# Altium footprint library Master.PcbLib: 178 footprints (part 3 of 12)
Each footprint in its own frame and in the unit in brackets; x right, y up, seen from the top. Pads: shape width x height; smd on the part's side, far side on the other; paste and mask are expansions set on the pad; w line width, h text height; cw(c..) or ccw(c..) is an arc to the next point about the centre after c.
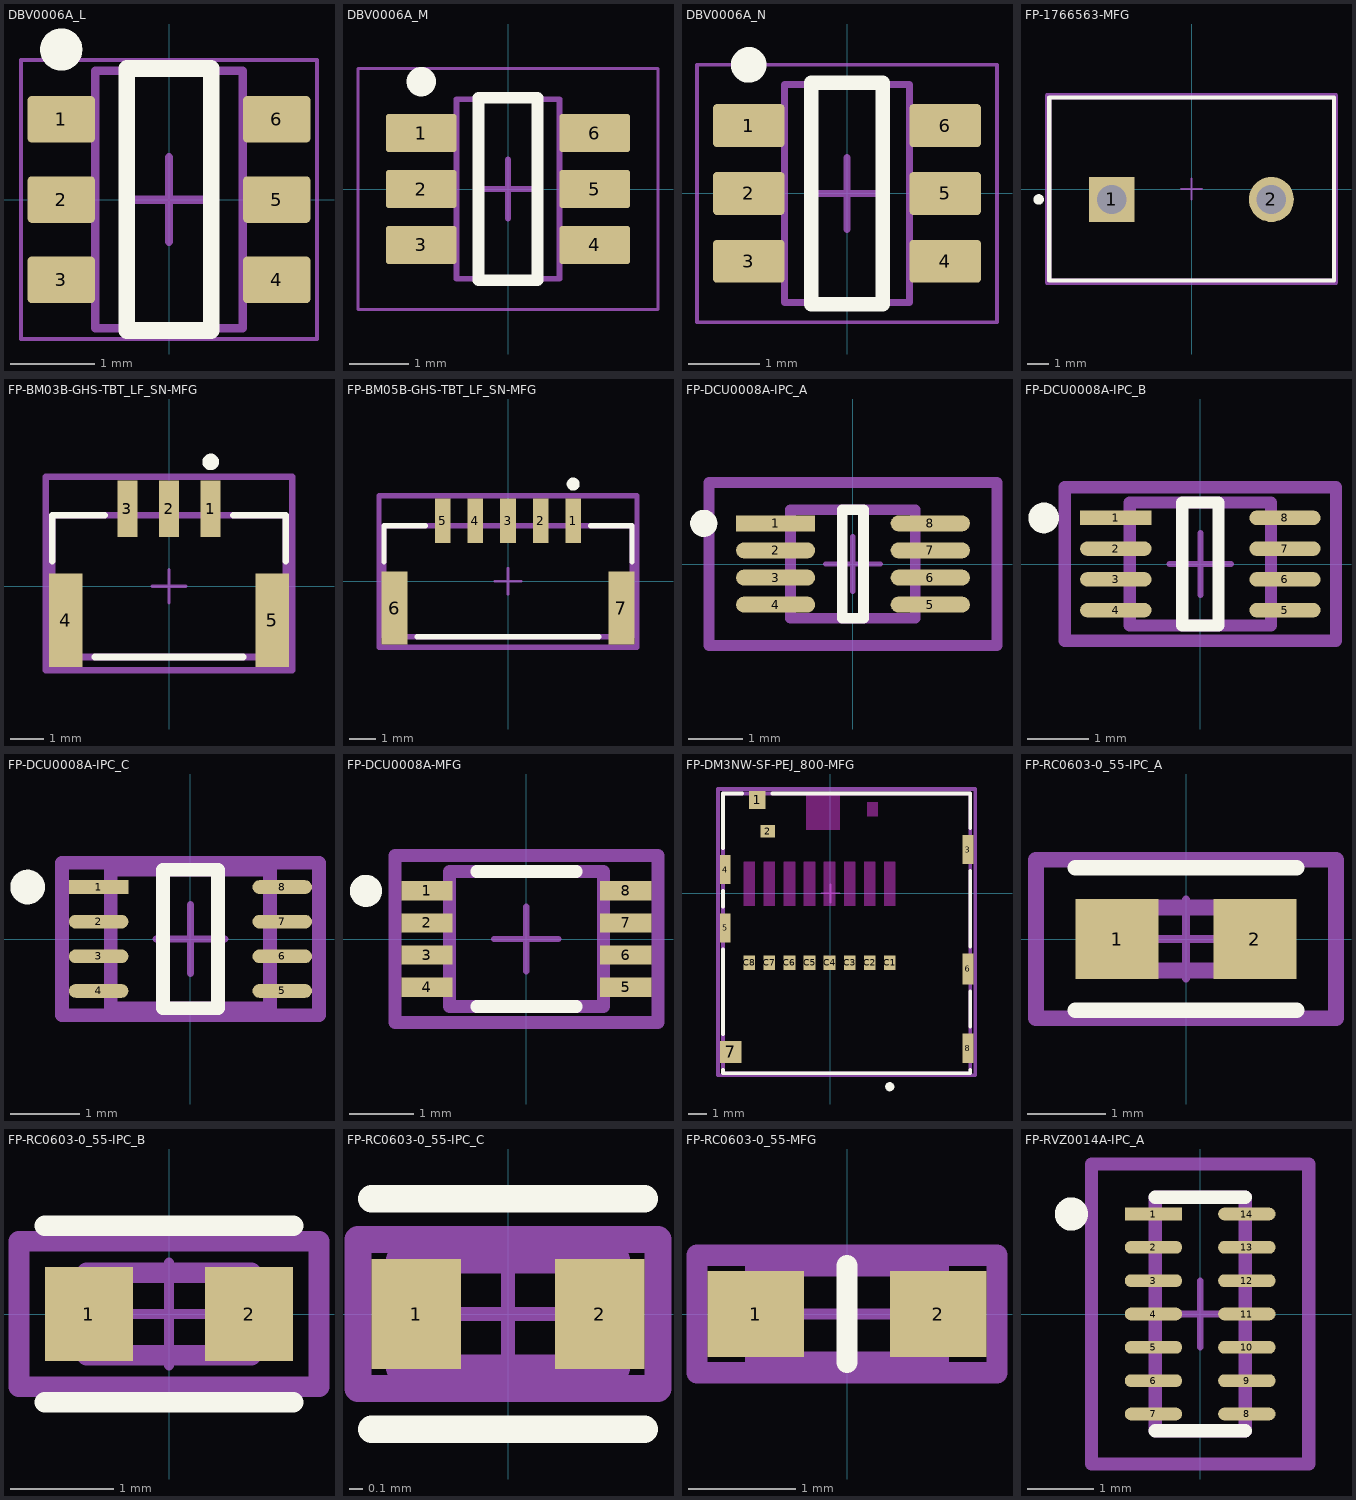
[diagram p2: the footprints below, top view; thin cyan lines are the x and y axes]

## DBV0006A_L [mm] "SOT23, 6-Leads, Body 3.05x1.75mm, Pitch 0.95mm, IPC High Density"
height 1.45
pads (6):
  rrect18% 0.8x0.55 smd: 1(-1.275,0.95) 2(-1.275,0) 3(-1.275,-0.95) 4(1.275,-0.95) 5(1.275,0) 6(1.275,0.95)
Top Overlay:
  circle w0.25: c-1.275,1.775 r0.125
  lines w0.2: -0.5,-1.55 0.5,-1.55 0.5,1.55 -0.5,1.55 -0.5,-1.55
Mechanical 1:
  text ".Designator" at -0.635,-0.127 h0.4
Mechanical 13:
  lines w0.1: -0.875,-1.525 -0.875,1.525 0.875,1.525 0.875,-1.525 -0.875,-1.525
Top Courtyard:
  lines w0.05: -1.75,-1.65 -1.75,1.65 1.75,1.65 1.75,-1.65 -1.75,-1.65
  lines w0.1: -0.5,0 0.5,0 ; 0,-0.5 0,0.5
3D body "DBV0006AakaMF06A.stp": height 1.11, standoff -0.01, extent -1.422,-1.461 1.422,1.46

## DBV0006A_M [mm] "SOT23, 6-Leads, Body 3.05x1.75mm, Pitch 0.95mm, IPC Low Density"
height 1.45
pads (6):
  rrect15% 1.2x0.65 smd: 1(-1.475,0.95) 2(-1.475,0) 3(-1.475,-0.95) 4(1.475,-0.95) 5(1.475,0) 6(1.475,0.95)
Top Overlay:
  circle w0.25: c-1.475,1.825 r0.125
  lines w0.2: -0.5,-1.55 -0.5,1.55 0.5,1.55 0.5,-1.55 -0.5,-1.55
Mechanical 1:
  text ".Designator" at -0.635,-0.127 h0.4
Mechanical 13:
  lines w0.1: -0.875,-1.525 0.875,-1.525 0.875,1.525 -0.875,1.525 -0.875,-1.525
Top Courtyard:
  lines w0.05: -2.55,-2.05 2.55,-2.05 2.55,2.05 -2.55,2.05 -2.55,-2.05
  lines w0.1: -0.5,0 0.5,0 ; 0,-0.5 0,0.5
3D body "DBV0006AakaMF06A.stp": height 1.11, standoff -0.01, extent -1.422,-1.461 1.422,1.46

## DBV0006A_N [mm] "SOT23, 6-Leads, Body 3.05x1.75mm, Pitch 0.95mm, IPC Medium Density"
height 1.45
pads (6):
  rrect17% 1x0.6 smd: 1(-1.375,0.95) 2(-1.375,0) 3(-1.375,-0.95) 4(1.375,-0.95) 5(1.375,0) 6(1.375,0.95)
Top Overlay:
  circle w0.25: c-1.375,1.8 r0.125
  lines w0.2: -0.5,-1.55 0.5,-1.55 0.5,1.55 -0.5,1.55 -0.5,-1.55
Mechanical 1:
  text ".Designator" at -0.635,-0.127 h0.4
Mechanical 13:
  lines w0.1: -0.875,-1.525 -0.875,1.525 0.875,1.525 0.875,-1.525 -0.875,-1.525
Top Courtyard:
  lines w0.05: -2.1,-1.8 -2.1,1.8 2.1,1.8 2.1,-1.8 -2.1,-1.8
  lines w0.1: -0.5,0 0.5,0 ; 0,-0.5 0,0.5
3D body "DBV0006AakaMF06A.stp": height 1.11, standoff -0.01, extent -1.422,-1.461 1.422,1.46

## FP-1766563-MFG [mm]
pads (2):
  rect 2.15x2.15 hole 1.4 paste-2539.97 mask+0: 1(-3.81,-0.5)
  round 2.15 hole 1.4 paste-2539.97 mask+0: 2(3.81,-0.5)
Top Overlay:
  circle w0.25: c-7.3,-0.5 r0.125
  lines w0.2: -6.795,-4.375 -6.795,4.375 6.795,4.375 6.795,-4.375 -6.795,-4.375
Top 3D Body:
  lines w0.2: -6.795,-4.375 -6.795,4.375 6.795,4.375 6.795,-4.375 -6.795,-4.375
Top Component Center:
  lines w0.1: -0.5,0 0.5,0 ; 0,-0.5 0,0.5
Top Assembly:
  lines w0.2: -6.895,-4.475 -6.895,4.475 6.895,4.475 6.895,-4.475 -6.895,-4.475
  text ".Designator" at 0,0.188 h1
Top Courtyard:
  lines w0.2: -6.895,-4.475 -6.895,4.475 6.895,4.475 6.895,-4.475 -6.895,-4.475
3D body "Conn_Phoenix_Contact_1766563_eec.STEP": height 0.25, standoff 0, extent -6.895,-4.475 6.895,4.475

## FP-BM03B-GHS-TBT_LF_SN-MFG [mm]
pads (5):
  rect 0.6x1.7 smd paste+0 mask+0: 1(1.25,2.325) 2(0,2.325) 3(-1.25,2.325)
  rect 1x2.8 smd paste+0 mask+0: 4(-3.1,-1.025) 5(3.1,-1.025)
Top Overlay:
  circle w0.25: c1.25,3.725 r0.125
  lines w0.2: -3.5,0.75 -3.5,2.125 -1.925,2.125 ; -2.225,-2.125 2.225,-2.125 ; 1.925,2.125 3.5,2.125 3.5,0.75
Top 3D Body:
  lines w0.2: -3.5,-2.125 -3.5,2.125 3.5,2.125 3.5,-2.125 -3.5,-2.125
Top Component Center:
  lines w0.1: -0.5,0 0.5,0 ; 0,-0.5 0,0.5
Top Assembly:
  lines w0.2: -3.7,-2.525 -3.7,3.275 3.7,3.275 3.7,-2.525 -3.7,-2.525
  text ".Designator" at 0,0.563 h1
Top Courtyard:
  lines w0.2: -3.7,-2.525 -3.7,3.275 3.7,3.275 3.7,-2.525 -3.7,-2.525
3D body "Conn_JST_BM03B-GHS-TBT_LF_SN_N_eec.STEP": height 0.25, standoff 0, extent -3.7,-2.525 3.7,3.275

## FP-BM05B-GHS-TBT_LF_SN-MFG [mm]
pads (7):
  rect 0.6x1.7 smd paste+0 mask+0: 1(2.5,2.325) 2(1.25,2.325) 3(0,2.325) 4(-1.25,2.325) 5(-2.5,2.325)
  rect 1x2.8 smd paste+0 mask+0: 6(-4.35,-1.025) 7(4.35,-1.025)
Top Overlay:
  circle w0.25: c2.5,3.725 r0.125
  lines w0.2: -4.75,0.75 -4.75,2.125 -3.175,2.125 ; -3.475,-2.125 3.475,-2.125 ; 3.175,2.125 4.75,2.125 4.75,0.75
Top 3D Body:
  lines w0.2: -4.75,-2.125 -4.75,2.125 4.75,2.125 4.75,-2.125 -4.75,-2.125
Top Component Center:
  lines w0.1: -0.5,0 0.5,0 ; 0,-0.5 0,0.5
Top Assembly:
  lines w0.2: -4.95,-2.525 -4.95,3.275 4.95,3.275 4.95,-2.525 -4.95,-2.525
  text ".Designator" at 0,0.563 h1
Top Courtyard:
  lines w0.2: -4.95,-2.525 -4.95,3.275 4.95,3.275 4.95,-2.525 -4.95,-2.525
3D body "Conn_JST_BM05B-GHS-TBT_LF_SN_N_eec.STEP": height 0.25, standoff 0, extent -4.95,-2.525 4.95,3.275

## FP-DCU0008A-IPC_A [mm]
pads (8):
  rect 1.46x0.297 smd paste+0 mask+0: 1(-1.426,0.75)
  rrect100% 1.46x0.297 smd paste+0 mask+0: 2(-1.426,0.25) 3(-1.426,-0.25) 4(-1.426,-0.75) 5(1.426,-0.75) 6(1.426,-0.25) 7(1.426,0.25) 8(1.426,0.75)
Top Overlay:
  circle w0.25: c-2.75,0.75 r0.125
  lines w0.2: -0.196,-1 -0.196,1 0.196,1 0.196,-1 -0.196,-1
Top 3D Body:
  lines w0.2: -1.15,-1 -1.15,1 1.15,1 1.15,-1 -1.15,-1
Top Component Center:
  lines w0.1: -0.5,0 0.5,0 ; 0,-0.5 0,0.5
Top Assembly:
  lines w0.2: -2.656,-1.5 -2.656,1.5 2.656,1.5 2.656,-1.5 -2.656,-1.5
  text ".Designator" at 0,0.188 h1
Top Courtyard:
  lines w0.2: -2.656,-1.5 -2.656,1.5 2.656,1.5 2.656,-1.5 -2.656,-1.5
3D body "IC_Texas_Instruments_SN74LVC3G34DCUR_eec.STEP": height 0.25, standoff 0, extent -2.656,-1.5 2.656,1.5

## FP-DCU0008A-IPC_B [mm]
pads (8):
  rect 1.16x0.237 smd paste+0 mask+0: 1(-1.376,0.75)
  rrect100% 1.16x0.237 smd paste+0 mask+0: 2(-1.376,0.25) 3(-1.376,-0.25) 4(-1.376,-0.75) 5(1.376,-0.75) 6(1.376,-0.25) 7(1.376,0.25) 8(1.376,0.75)
Top Overlay:
  circle w0.25: c-2.55,0.75 r0.125
  lines w0.2: -0.296,-1 0.296,-1 0.296,1 -0.296,1 -0.296,-1
Top 3D Body:
  lines w0.2: -1.15,-1 1.15,-1 1.15,1 -1.15,1 -1.15,-1
Top Component Center:
  lines w0.1: -0.5,0 0.5,0 ; 0,-0.5 0,0.5
Top Assembly:
  lines w0.2: -2.206,-1.25 2.206,-1.25 2.206,1.25 -2.206,1.25 -2.206,-1.25
  text ".Designator" at 0,0.188 h1
Top Courtyard:
  lines w0.2: -2.206,-1.25 2.206,-1.25 2.206,1.25 -2.206,1.25 -2.206,-1.25
3D body "IC_Texas_Instruments_SN74LVC3G34DCUR_eec.STEP": height 0.25, standoff 0, extent -2.206,-1.25 2.206,1.25

## FP-DCU0008A-IPC_C [mm]
pads (8):
  rect 0.86x0.197 smd paste+0 mask+0: 1(-1.326,0.75)
  rrect100% 0.86x0.197 smd paste+0 mask+0: 2(-1.326,0.25) 3(-1.326,-0.25) 4(-1.326,-0.75) 5(1.326,-0.75) 6(1.326,-0.25) 7(1.326,0.25) 8(1.326,0.75)
Top Overlay:
  circle w0.25: c-2.35,0.75 r0.125
  lines w0.2: -0.396,-1 -0.396,1 0.396,1 0.396,-1 -0.396,-1
Top 3D Body:
  lines w0.2: -1.15,-1 -1.15,1 1.15,1 1.15,-1 -1.15,-1
Top Component Center:
  lines w0.1: -0.5,0 0.5,0 ; 0,-0.5 0,0.5
Top Assembly:
  lines w0.2: -1.856,-1.1 -1.856,1.1 1.856,1.1 1.856,-1.1 -1.856,-1.1
  text ".Designator" at 0,0.188 h1
Top Courtyard:
  lines w0.2: -1.856,-1.1 -1.856,1.1 1.856,1.1 1.856,-1.1 -1.856,-1.1
3D body "IC_Texas_Instruments_SN74LVC3G34DCUR_eec.STEP": height 0.25, standoff 0, extent -1.856,-1.1 1.856,1.1

## FP-DCU0008A-MFG [mm]
pads (8):
  rect 0.8x0.3 smd paste-1000 mask+0: 1(-1.55,0.75) 2(-1.55,0.25) 3(-1.55,-0.25) 4(-1.55,-0.75) 5(1.55,-0.75) 6(1.55,-0.25) 7(1.55,0.25) 8(1.55,0.75)
Top Overlay:
  circle w0.25: c-2.5,0.75 r0.125
  lines w0.2: -0.775,-1.05 0.775,-1.05 ; -0.775,1.05 0.775,1.05
Top Paste:
  rectangle: 1.175,-0.875 1.925,-0.625
  rectangle: 1.175,-0.375 1.925,-0.125
  rectangle: 1.175,0.125 1.925,0.375
  rectangle: 1.175,0.625 1.925,0.875
  rectangle: -1.925,-0.875 -1.175,-0.625
  rectangle: -1.925,-0.375 -1.175,-0.125
  rectangle: -1.925,0.125 -1.175,0.375
  rectangle: -1.925,0.625 -1.175,0.875
Top 3D Body:
  lines w0.2: -1.2,-1.05 -1.2,1.05 1.2,1.05 1.2,-1.05 -1.2,-1.05
Top Component Center:
  lines w0.1: -0.5,0 0.5,0 ; 0,-0.5 0,0.5
Top Assembly:
  lines w0.2: -2.05,-1.3 -2.05,1.3 2.05,1.3 2.05,-1.3 -2.05,-1.3
  text ".Designator" at 0,0.188 h1
Top Courtyard:
  lines w0.2: -2.05,-1.3 -2.05,1.3 2.05,1.3 2.05,-1.3 -2.05,-1.3
3D body "IC_Texas_Instruments_SN74LVC3G34DCUR_eec.STEP": height 0.25, standoff 0, extent -2.05,-1.3 2.05,1.3

## FP-DM3NW-SF-PEJ_800-MFG [mm]
pads (16):
  rect 0.9x1 smd paste+0 mask+0: 1(-4.02,5.12)
  rect 0.8x0.7 smd paste+0 mask+0: 2(-3.44,3.4)
  rect 0.6x1.6 smd paste+0 mask+0: 3(7.53,2.4) 4(-5.77,1.3) 5(-5.77,-1.9) 8(7.53,-8.5)
  rect 0.6x1.7 smd paste+0 mask+0: 6(7.53,-4.15)
  rect 1.2x1.2 smd paste+0 mask+0: 7(-5.47,-8.7)
  rect 0.64x0.8 smd paste+0 mask+0: C1(3.25,-3.8) C2(2.15,-3.8) C3(1.05,-3.8) C4(-0.05,-3.8) C5(-1.15,-3.8) C6(-2.25,-3.8) C7(-3.35,-3.8) C8(-4.45,-3.8)
Top Overlay:
  circle w0.25: c3.25,-10.605 r0.125
  lines w0.2: -5.895,-9.675 -5.895,-9.875 7.655,-9.875 7.655,-9.675 ; -5.895,-7.725 -5.895,-3.075 ; -5.895,-0.725 -5.895,0.125 ; -5.895,2.475 -5.895,5.475 -4.845,5.475 ; -3.195,5.475 7.655,5.475 7.655,3.575 ; 7.655,-7.325 7.655,-5.375 ; 7.655,-2.925 7.655,1.225
Keep-Out Layer:
  rectangle: 2.01,4.2 2.61,5
  rectangle: -1.35,3.48 0.51,5.48
  rectangle: 2.93,-0.705 3.57,1.745
  rectangle: 1.83,-0.705 2.47,1.745
  rectangle: 0.73,-0.705 1.37,1.745
  rectangle: -0.37,-0.705 0.27,1.745
  rectangle: -1.47,-0.705 -0.83,1.745
  rectangle: -2.57,-0.705 -1.93,1.745
  rectangle: -3.67,-0.705 -3.03,1.745
  rectangle: -4.77,-0.705 -4.13,1.745
Top 3D Body:
  lines w0.2: -5.895,-9.875 -5.895,5.475 7.655,5.475 7.655,-9.875 -5.895,-9.875
Top Component Center:
  lines w0.1: -0.5,0 0.5,0 ; 0,-0.5 0,0.5
Top Assembly:
  lines w0.2: -6.17,-9.975 -6.17,5.72 7.93,5.72 7.93,-9.975 -6.17,-9.975
  text ".Designator" at 0.88,-1.94 h1
Top Courtyard:
  lines w0.2: -6.17,-9.975 -6.17,5.72 7.93,5.72 7.93,-9.975 -6.17,-9.975
3D body "Conn_Hirose_Electric_Co_Ltd_DM3NW-SF-PEJ_800_eec.STEP": height 0.25, standoff 0, extent -6.17,-9.975 7.93,5.72

## FP-RC0603-0_55-IPC_A [mm]
pads (2):
  rect 1.059x1.012 smd paste+0 mask+0: 1(-0.877,0) 2(0.877,0)
Top Overlay:
  lines w0.2: -1.406,-0.906 1.406,-0.906 ; -1.406,0.906 1.406,0.906
Top 3D Body:
  lines w0.2: -0.8,-0.4 -0.8,0.4 0.8,0.4 0.8,-0.4 -0.8,-0.4
Top Component Center:
  lines w0.1: -0.5,0 0.5,0 ; 0,-0.5 0,0.5
Top Assembly:
  lines w0.2: -1.906,-1.006 -1.906,1.006 1.906,1.006 1.906,-1.006 -1.906,-1.006
  text ".Designator" at 0,0.188 h1
Top Courtyard:
  lines w0.2: -1.906,-1.006 -1.906,1.006 1.906,1.006 1.906,-1.006 -1.906,-1.006
3D body "Res_Yageo_RC0603FR-07100KL_eec.STEP": height 0.25, standoff 0, extent -1.906,-1.006 1.906,1.006

## FP-RC0603-0_55-IPC_B [mm]
pads (2):
  rect 0.859x0.912 smd paste+0 mask+0: 1(-0.777,0) 2(0.777,0)
Top Overlay:
  lines w0.2: -1.206,-0.856 1.206,-0.856 ; -1.206,0.856 1.206,0.856
Top 3D Body:
  lines w0.2: -0.8,-0.4 0.8,-0.4 0.8,0.4 -0.8,0.4 -0.8,-0.4
Top Component Center:
  lines w0.1: -0.5,0 0.5,0 ; 0,-0.5 0,0.5
Top Assembly:
  lines w0.2: -1.456,-0.706 1.456,-0.706 1.456,0.706 -1.456,0.706 -1.456,-0.706
  text ".Designator" at 0,0.188 h1
Top Courtyard:
  lines w0.2: -1.456,-0.706 1.456,-0.706 1.456,0.706 -1.456,0.706 -1.456,-0.706
3D body "Res_Yageo_RC0603FR-07100KL_eec.STEP": height 0.25, standoff 0, extent -1.456,-0.706 1.456,0.706

## FP-RC0603-0_55-IPC_C [mm]
pads (2):
  rect 0.659x0.812 smd paste+0 mask+0: 1(-0.677,0) 2(0.677,0)
Top Overlay:
  lines w0.2: -1.006,-0.85 1.006,-0.85 ; -1.006,0.85 1.006,0.85
Top 3D Body:
  lines w0.2: -0.8,-0.4 0.8,-0.4 0.8,0.4 -0.8,0.4 -0.8,-0.4
Top Component Center:
  lines w0.1: -0.5,0 0.5,0 ; 0,-0.5 0,0.5
Top Assembly:
  lines w0.2: -1.106,-0.55 1.106,-0.55 1.106,0.55 -1.106,0.55 -1.106,-0.55
  text ".Designator" at 0,0.188 h1
Top Courtyard:
  lines w0.2: -1.106,-0.55 1.106,-0.55 1.106,0.55 -1.106,0.55 -1.106,-0.55
3D body "Res_Yageo_RC0603FR-07100KL_eec.STEP": height 0.25, standoff 0, extent -1.106,-0.55 1.106,0.55

## FP-RC0603-0_55-MFG [mm]
pads (2):
  rect 0.9x0.8 smd paste+0 mask+0: 1(-0.85,0) 2(0.85,0)
Top Overlay:
  lines w0.2: 0,-0.45 0,0.45
Top 3D Body:
  lines w0.2: -0.85,-0.45 0.85,-0.45 0.85,0.45 -0.85,0.45 -0.85,-0.45
Top Component Center:
  lines w0.1: -0.5,0 0.5,0 ; 0,-0.5 0,0.5
Top Assembly:
  lines w0.2: -1.4,-0.55 1.4,-0.55 1.4,0.55 -1.4,0.55 -1.4,-0.55
  text ".Designator" at 0,-0.001 h1
Top Courtyard:
  lines w0.2: -1.4,-0.55 1.4,-0.55 1.4,0.55 -1.4,0.55 -1.4,-0.55
3D body "Res_Yageo_RC0603FR-0751KL_eec.STEP": height 0.25, standoff 0, extent -1.4,-0.55 1.4,0.55

## FP-RVZ0014A-IPC_A [mm]
pads (14):
  rect 0.861x0.192 smd paste+0 mask+0: 1(-0.701,1.5)
  rrect100% 0.861x0.192 smd paste+0 mask+0: 2(-0.701,1) 3(-0.701,0.5) 4(-0.701,0) 5(-0.701,-0.5) 6(-0.701,-1) 7(-0.701,-1.5) 8(0.701,-1.5) 9(0.701,-1) 10(0.701,-0.5) 11(0.701,0) 12(0.701,0.5) 13(0.701,1) 14(0.701,1.5)
Top Overlay:
  circle w0.25: c-1.931,1.5 r0.125
  lines w0.2: -0.675,-1.75 0.675,-1.75 ; -0.675,1.75 0.675,1.75
Top 3D Body:
  lines w0.2: -0.675,-1.75 -0.675,1.75 0.675,1.75 0.675,-1.75 -0.675,-1.75
Top Component Center:
  lines w0.1: -0.5,0 0.5,0 ; 0,-0.5 0,0.5
Top Assembly:
  lines w0.2: -1.631,-2.25 -1.631,2.25 1.631,2.25 1.631,-2.25 -1.631,-2.25
  text ".Designator" at 0,-0.001 h1
Top Courtyard:
  lines w0.2: -1.631,-2.25 -1.631,2.25 1.631,2.25 1.631,-2.25 -1.631,-2.25
3D body "IC_Texas_Instruments_TPD6E05U06RVZR_eec.STEP": height 0.25, standoff 0, extent -1.631,-2.25 1.631,2.25